# Altium schematic symbol library Radial2.5_cap.SchLib: 1 symbol
Pins are listed as number, name and electrical type; pins without a type are passive.

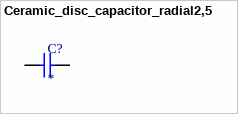
[diagram p0: symbol Ceramic_disc_capacitor_radial2,5]

## Ceramic_disc_capacitor_radial2,5
designator C?
footprint Ceramic_disc_capacitor_radial2,5
pins: 1, 2